# Altium footprint library AVP32F069_EVM_Rev1.0_220506.PcbLib: 40 footprints (part 3 of 3)
Each footprint in its own frame and in the unit in brackets; x right, y up, seen from the top. Pads: shape width x height; smd on the part's side, far side on the other; paste and mask are expansions set on the pad; w line width, h text height; cw(c..) or ccw(c..) is an arc to the next point about the centre after c.
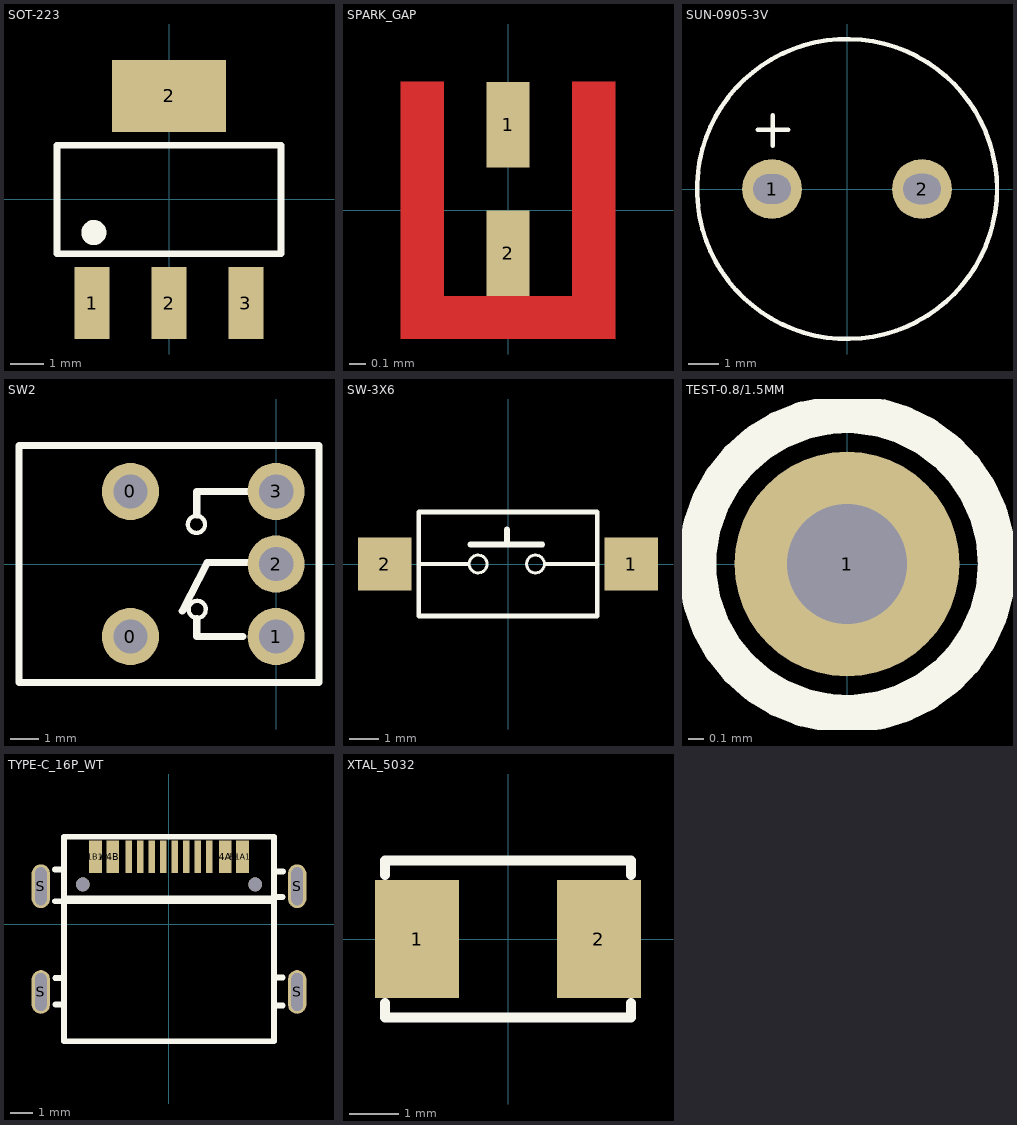
[diagram p2: the footprints below, top view; thin cyan lines are the x and y axes]

## SOT-223 [mm] "SOT-223/SC-73; 4 Leads; Body 6.7 x 7.3 mm, inc. leads (LxW max)"
height 1.7
pads (4):
  rect 1.05x2.15 smd: 1(-2.3,-3.1) 2(0,-3.1) 3(2.3,-3.1)
  rect 3.4x2.15 smd: 2(0,3.1)
Top Overlay:
  circle w0.5: c-2.249,-0.991 r0.125
  lines w0.2: -3.35,-1.625 -3.35,1.625 3.35,1.625 3.35,-1.625 -3.35,-1.625
3D body "User Library-SOT-223-2.STEP": height 1.85, standoff -0.05, extent -3.295,-3.497 3.405,3.708

## SPARK_GAP [mil] "无Paste层"
pads (2):
  rect 10x20 smd paste-39.37: 1(0,20) 2(0,-10)
Top Layer:
  region: -15,30 -25,30 -25,-30 25,-30 25,30 15,30 15,-20 -15,-20
Top Solder:
  region: -25,-30 25,-30 25,40 -25,40

## SUN-0905-3V [mm] "蜂鸣器/9.6*5 有源 3V 电磁蜂鸣器"
height 5
pads (2):
  round 2 hole 1 slot 1.25 at 0 deg: 1(-2.5,0) 2(2.5,0)
Top Overlay:
  circle w0.15: c0,0 r5
  lines w0.15: -2.972,1.967 -1.956,1.967 ; -2.475,1.448 -2.475,2.464
3D body: height 6.05, standoff 1.05, extent -0.75,-0.747 0.75,0.748
3D body: height 6, standoff 0, extent -4.994,-4.998 5,4.999

## SW2 [mm] "扭子开关单刀无复位无中点"
height 8
pads (5):
  round 2 hole 1.2: 0(-5.1,-2.54) 0(-5.1,2.54) 1(0,-2.54) 2(0,0) 3(0,2.54)
Top Overlay:
  lines w0.15: -2.489,1.386 cw(c-2.789,1.386) -2.489,1.397 ; -2.464,-1.6 cw(c-2.764,-1.589) -2.464,-1.589
  lines w0.254: -3.288,-1.647 -2.413,0.051 -0.152,0.051 -0.025,-0.076 ; -2.781,-1.905 -2.781,-2.541 -1.168,-2.541 ; -2.781,1.727 -2.781,2.541 -0.203,2.541 ; -9,-4.15 -9,4.15 1.5,4.15 1.5,-4.15 -9,-4.15
3D body "User Library-switch et spdt.STEP": height 5.96, standoff -3.48, extent -26.098,-4.115 0.698,4.013

## SW-3X6 [mm] "立创商城 轻触开关 3X6 鸿源精密"
height 2.5
pads (2):
  rect 1.8x1.8 smd mask+0.05: 1(4.15,0) 2(-4.15,0)
Top Overlay:
  circle w0.1: c0.925,0 r0.3
  circle w0.1: c-1.006,0 r0.3
  lines w0.127: -2.946,0 -1.361,0 ; 1.28,0 2.946,0
  lines w0.154: -3,-1.75 3,-1.75 3,1.75 -3,1.75 -3,-1.75
  lines w0.2: -1.26,0.66 1.153,0.66 ; -0.053,0.66 -0.041,0.673 -0.041,1.168
3D body: height 3.5, standoff 0, extent -2.946,-1.751 2.947,1.75
3D body: height 4, standoff 0, extent -1.511,-0.558 1.511,0.507

## TEST-0.8/1.5MM [mm]
height 5.5
pads (1):
  round 1.5 hole 0.8: 1(0,0)
Top Overlay:
  circle w0.254: c0,0 r1

## TYPE-C_16P_WT [mm]
pads (18):
  rect 0.55x1.4 smd mask+0.08: A1B12(-3.2,2.94) A4B9(-2.45,2.94) B1A12(3.2,2.94) B4A9(2.45,2.94)
  rect 0.3x1.4 smd mask+0.08: A5(-1.249,2.94) A6(-0.251,2.94) A7(0.25,2.94) A8(1.25,2.94) B5(1.75,2.94) B6(0.75,2.94) B7(-0.751,2.94) B8(-1.749,2.94)
  oval 0.8x1.9 hole 0.5 slot 1.65 at 90 deg: S(-5.575,-2.94) S(-5.575,1.66) S(5.575,-2.94) S(5.575,1.66)
  round 0.6 hole 0.6 unplated: ""(-3.75,1.74) ""(3.75,1.74)
Top Overlay:
  lines w0.254: -4.953,1.01 -4.572,1.01 ; -4.953,2.387 -4.572,2.387 ; -4.947,-2.329 -4.572,-2.329 ; -4.944,-3.485 -4.572,-3.485 ; -4.572,1.137 4.572,1.137 ; -4.572,1.188 -4.572,-5.08 4.572,-5.08 4.572,1.188 4.944,1.188 ; 4.572,-3.525 4.945,-3.525 ; 4.572,-2.315 4.948,-2.315 ; 4.572,2.304 4.953,2.304 ; -4.572,1.01 4.572,1.01 4.572,3.81 -4.572,3.81 -4.572,1.01
Top Paste:
  region: 5.175,-2.39 5.175,-2.311 5.236,-2.164 5.349,-2.051 5.496,-1.99 5.655,-1.99 5.802,-2.051 5.914,-2.164 5.975,-2.311 5.975,-2.39 5.975,-3.49 5.975,-3.57 5.914,-3.717 5.802,-3.829 5.655,-3.89 5.496,-3.89 5.349,-3.829 5.236,-3.717 5.175,-3.57 5.175,-3.49
  region: 5.175,2.21 5.175,2.29 5.236,2.437 5.349,2.549 5.496,2.61 5.655,2.61 5.802,2.549 5.914,2.437 5.975,2.29 5.975,2.21 5.975,1.11 5.975,1.031 5.914,0.883 5.802,0.771 5.655,0.71 5.496,0.71 5.349,0.771 5.236,0.883 5.175,1.031 5.175,1.11
  region: -5.975,-2.39 -5.975,-2.311 -5.914,-2.164 -5.802,-2.051 -5.655,-1.99 -5.495,-1.99 -5.348,-2.051 -5.236,-2.164 -5.175,-2.311 -5.175,-2.39 -5.175,-3.49 -5.175,-3.57 -5.236,-3.717 -5.348,-3.829 -5.495,-3.89 -5.655,-3.89 -5.802,-3.829 -5.914,-3.717 -5.975,-3.57 -5.975,-3.49
  region: -5.975,2.21 -5.975,2.29 -5.914,2.437 -5.802,2.549 -5.655,2.61 -5.495,2.61 -5.348,2.549 -5.236,2.437 -5.175,2.29 -5.175,2.21 -5.175,1.11 -5.175,1.031 -5.236,0.883 -5.348,0.771 -5.495,0.71 -5.655,0.71 -5.802,0.771 -5.914,0.883 -5.975,1.031 -5.975,1.11
Mechanical 15:
  circle w0.2: c3.75,1.74 r0.1
  circle w0.2: c-3.75,1.74 r0.1

## XTAL_5032 [mm] "5032晶振"
height 1.2
pads (2):
  rect 1.7x2.4 smd: 1(-1.85,0) 2(1.85,0)
Top Overlay:
  lines w0.203: -2.5,-1.3 -2.5,-1.6 2.5,-1.6 2.5,-1.3 ; -2.5,1.3 -2.5,1.6 2.5,1.6 2.5,1.3
3D body "User Library-ABM3-1.STEP": height 1.3, standoff 0, extent -2.525,-1.549 2.475,1.651